# Altium footprint library 1.10-电容.PcbLib: 193 footprints (part 2 of 13)
Each footprint in its own frame and in the unit in brackets; x right, y up, seen from the top. Pads: shape width x height; smd on the part's side, far side on the other; paste and mask are expansions set on the pad; w line width, h text height; cw(c..) or ccw(c..) is an arc to the next point about the centre after c.
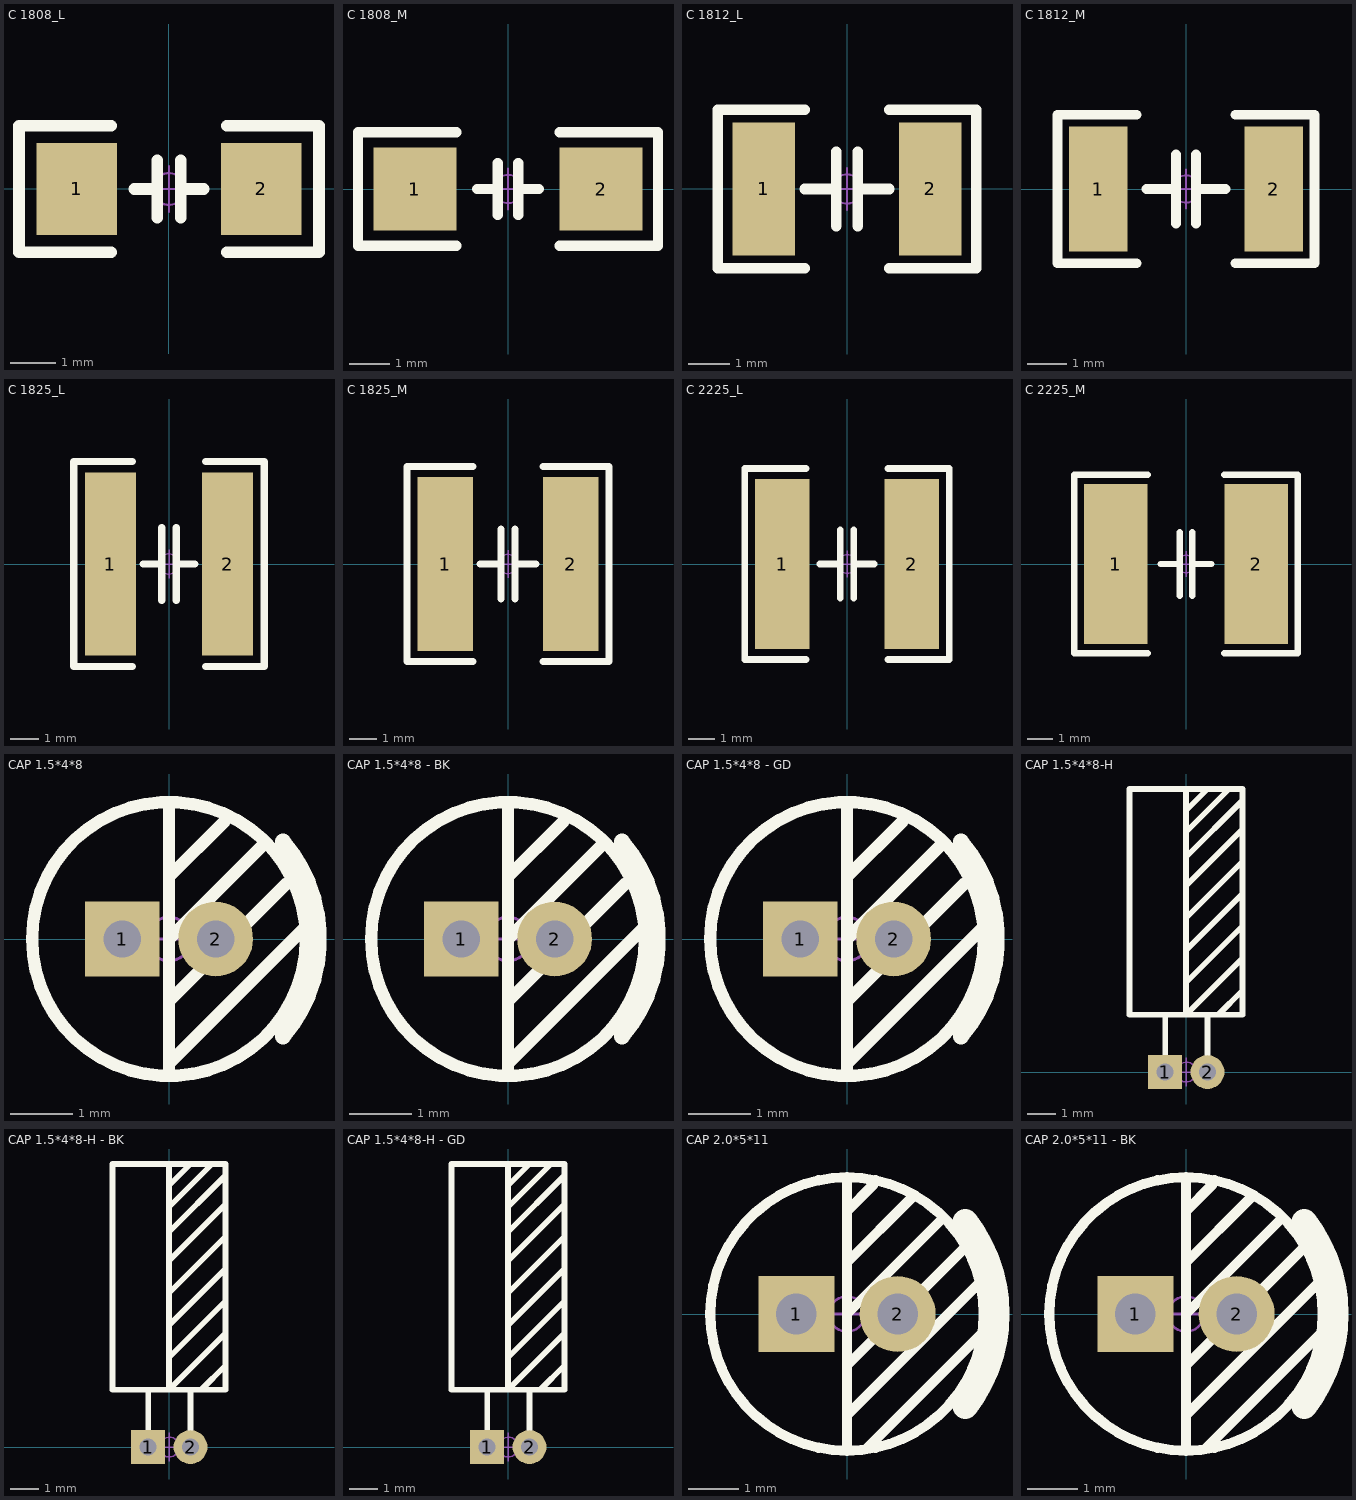
[diagram p1: the footprints below, top view; thin cyan lines are the x and y axes]

## C 1808_L [mil] "无极性贴片电容"
pads (2):
  rect 70x80 smd: 1(-80,0) 2(80,0)
Top Overlay:
  lines w10: -50,-55 -130,-55 -130,55 -50,55 ; -30,0 -10,0 ; -10,-25 -10,25 ; 10,-25 10,25 ; 10,0 30,0 ; 50,-55 130,-55 130,55 50,55
Mechanical 15:
  circle w1.97: c0,0 r13.78
  lines w1.97: -19.68,0 19.68,0 ; 0,-19.68 0,19.68
3D body "C 1808.STEP": height 59.45, standoff -0.39, extent -90.55,-39.76 90.55,39.76

## C 1808_M [mil] "无极性贴片电容"
pads (2):
  rect 80x80 smd: 1(-90,0) 2(90,0)
Top Overlay:
  lines w10: -50,-55 -145,-55 -145,55 -50,55 ; -30,0 -10,0 ; -10,-25 -10,25 ; 10,-25 10,25 ; 10,0 30,0 ; 50,-55 145,-55 145,55 50,55
Mechanical 15:
  circle w1.97: c0,0 r13.78
  lines w1.97: -19.68,0 19.68,0 ; 0,-19.68 0,19.68
3D body "C 1808.STEP": height 59.45, standoff -0.39, extent -90.55,-39.76 90.55,39.76

## C 1812_L [mm] "无极性贴片电容                             淘宝ID:黄晶宝石"
pads (2):
  rect 1.5x3.2 smd: 1(-2,0) 2(2,0)
Top Overlay:
  lines w0.254: -1.016,-1.905 -3.1,-1.905 -3.1,1.905 -1.016,1.905 ; -1.016,0 -0.254,0 ; -0.254,-0.889 -0.254,0.889 ; 0.254,-0.889 0.254,0.889 ; 0.254,0 1.016,0 ; 1.016,-1.905 3.1,-1.905 3.1,1.905 1.016,1.905
Mechanical 15:
  circle w0.05: c0,0 r0.35
  lines w0.05: -0.5,0 0.5,0 ; 0,-0.5 0,0.5
3D body "C 1812.STEP": height 2.01, standoff -0.01, extent -2.3,-1.61 2.3,1.61

## C 1812_M [mm] "无极性贴片电容                             淘宝ID:黄晶宝石"
pads (2):
  rect 1.5x3.2 smd: 1(-2.25,0) 2(2.25,0)
Top Overlay:
  lines w0.254: -1.27,-1.905 -3.302,-1.905 -3.302,1.905 -1.27,1.905 ; -1.016,0 -0.254,0 ; -0.254,-0.889 -0.254,0.889 ; 0.254,-0.889 0.254,0.889 ; 0.254,0 1.016,0 ; 1.27,-1.905 3.302,-1.905 3.302,-0.508 3.302,1.905 1.27,1.905
Mechanical 15:
  circle w0.05: c0,0 r0.35
  lines w0.05: -0.5,0 0.5,0 ; 0,-0.5 0,0.5
3D body "C 1812.STEP": height 2.01, standoff -0.01, extent -2.3,-1.61 2.3,1.61

## C 1825_L [mil] "无极性贴片电容"
pads (2):
  rect 70x250 smd: 1(-80,0) 2(80,0)
Top Overlay:
  lines w10: -50,-140 -130,-140 -130,140 -50,140 ; -35,0 -10,0 ; -10,-50 -10,50 ; 10,-50 10,50 ; 10,0 35,0 ; 50,-140 130,-140 130,140 50,140
Mechanical 15:
  circle w1.97: c0,0 r13.78
  lines w1.97: -19.68,0 19.68,0 ; 0,-19.68 0,19.68
3D body "C 1825.STEP": height 63.39, standoff -0.39, extent -88.58,-125.4 88.58,125.4

## C 1825_M [mil] "无极性贴片电容                              淘宝ID:黄晶宝石"
pads (2):
  rect 80x250 smd: 1(-90,0) 2(90,0)
Top Overlay:
  lines w10: -50,-140 -145,-140 -145,140 -50,140 ; -40,0 -10,0 ; -10,-50 -10,50 ; 10,-50 10,50 ; 10,0 40,0 ; 50,-140 145,-140 145,140 50,140
Mechanical 15:
  circle w1.97: c0,0 r13.78
  lines w1.97: -19.68,0 19.68,0 ; 0,-19.68 0,19.68
3D body "C 1825.STEP": height 63.39, standoff -0.39, extent -88.58,-125.4 88.58,125.4

## C 2225_L [mil] "无极性贴片电容"
pads (2):
  rect 80x250 smd: 1(-95,0) 2(95,0)
Top Overlay:
  lines w10: -60,-140 -150,-140 -150,140 -60,140 ; -40,0 -10,0 ; -10,-50 -10,50 ; 10,-50 10,50 ; 10,0 40,0 ; 60,-140 150,-140 150,140 60,140
Mechanical 15:
  circle w1.97: c0,0 r13.78
  lines w1.97: -19.68,0 19.68,0 ; 0,-19.68 0,19.68
3D body "C 2225.STEP": height 63.39, standoff -0.39, extent -110.24,-125.4 110.24,125.4

## C 2225_M [mil] "无极性贴片电容"
pads (2):
  rect 100x250 smd: 1(-110,0) 2(110,0)
Top Overlay:
  lines w10: -60,-140 -175,-140 -175,140 -60,140 ; -40,0 -10,0 ; -10,-50 -10,50 ; 10,-50 10,50 ; 10,0 40,0 ; 60,-140 175,-140 175,140 60,140
Mechanical 15:
  circle w1.97: c0,0 r13.78
  lines w1.97: -19.68,0 19.68,0 ; 0,-19.68 0,19.68
3D body "C 2225.STEP": height 63.39, standoff -0.39, extent -110.24,-125.4 110.24,125.4

## CAP 1.5*4*8 [mm] "脚距1.5mm直径4mm高度8mm                    淘宝ID:黄晶宝石"
pads (2):
  rect 1.2x1.2 hole 0.6: 1(-0.75,0)
  round 1.2 hole 0.6: 2(0.75,0)
Top Overlay:
  circle w0.2: c0,0 r2.2
  lines w0.2: 0,-2.159 0,-2 ; 0,-1 1.897,0.897 ; 0,0 1.524,1.524 ; 0,1 0.897,1.897 ; 0,2.159 0,-2 ; 2.207,0.206 0,-2
  lines w0.254: 1.83,-1.568 ccw(c0,0) 1.83,1.568
Mechanical 15:
  circle w0.05: c0,0 r0.35
  lines w0.05: -0.5,0 0.5,0 ; 0,-0.5 0,0.5
3D body "CAP 1.5X4X8.STEP": height 8.04, standoff -3.46, extent -2,-1.999 2.02,1.999

## CAP 1.5*4*8 - BK [mm] "脚距1.5mm直径4mm高度8mm                       淘宝ID:黄晶宝石"
pads (2):
  rect 1.2x1.2 hole 0.6: 1(-0.75,0)
  round 1.2 hole 0.6: 2(0.75,0)
Top Overlay:
  circle w0.2: c0,0 r2.2
  lines w0.2: 0,-2.159 0,-2 ; 0,-1 1.897,0.897 ; 0,0 1.524,1.524 ; 0,1 0.897,1.897 ; 0,2.159 0,-2 ; 2.207,0.206 0,-2
  lines w0.254: 1.83,-1.568 ccw(c0,0) 1.83,1.568
Mechanical 15:
  circle w0.05: c0,0 r0.35
  lines w0.05: -0.5,0 0.5,0 ; 0,-0.5 0,0.5
3D body "CAP 1.5X4X8.STEP": height 8.05, standoff -3.45, extent -2,-1.999 2.02,1.999

## CAP 1.5*4*8 - GD [mm] "脚距1.5mm直径4mm高度8mm               淘宝ID:黄晶宝石"
pads (2):
  rect 1.2x1.2 hole 0.6: 1(-0.75,0)
  round 1.2 hole 0.6: 2(0.75,0)
Top Overlay:
  circle w0.2: c0,0 r2.2
  lines w0.2: 0,-2.159 0,-2 ; 0,-1 1.897,0.897 ; 0,0 1.524,1.524 ; 0,1 0.897,1.897 ; 0,2.159 0,-2 ; 2.207,0.206 0,-2
  lines w0.254: 1.83,-1.568 ccw(c0,0) 1.83,1.568
Mechanical 15:
  circle w0.05: c0,0 r0.35
  lines w0.05: -0.5,0 0.5,0 ; 0,-0.5 0,0.5
3D body "CAP 1.5X4X8.STEP": height 8.06, standoff -3.44, extent -2,-1.999 2.02,1.999

## CAP 1.5*4*8-H [mm] "脚距1.5mm直径4mm高度8mm"
pads (2):
  rect 1.2x1.2 hole 0.6: 1(-0.75,0)
  round 1.2 hole 0.6: 2(0.75,0)
Top Overlay:
  lines w0.2: -0.75,0 -0.75,2 ; -0.012,3.175 1.988,5.175 1.988,5.207 ; -0.012,4.318 1.988,6.318 1.988,6.35 ; -0.012,5.461 1.988,7.461 1.988,7.493 ; -0.012,6.604 1.988,8.604 1.988,8.636 ; -0.012,7.62 1.965,9.597 ccw(c1.911,9.652) 1.988,9.652 ; -0.012,8.509 1.51,10.031 cw(c1.512,10.03) 1.512,10.032 ; -0.012,9.271 0.748,10.031 cw(c0.75,10.03) 0.75,10.032 ; -0.012,10.032 -0.012,2.032 ; 0.75,0 0.75,2 ; 0.877,2.921 -0.012,2.032 ; 1.131,2.032 1.988,2.889 1.988,2.921 ; 1.988,4.064 1.988,4.032 -0.012,2.032 ; -2.012,2.032 -2.012,10.032 1.988,10.032 1.988,2.032 -2.012,2.032
Mechanical 15:
  circle w0.05: c0,0 r0.35
  lines w0.05: -0.5,0 0.5,0 ; 0,-0.5 0,0.5
3D body "CAP 1.5X4X8-H.STEP": height 4.02, standoff -3.48, extent -2,-0.25 2.02,10

## CAP 1.5*4*8-H - BK [mm] "脚距1.5mm直径4mm高度8mm           淘宝ID:黄晶宝石"
pads (2):
  rect 1.2x1.2 hole 0.6: 1(-0.75,0)
  round 1.2 hole 0.6: 2(0.75,0)
Top Overlay:
  lines w0.2: -0.75,0 -0.75,2 ; -0.012,3.175 1.988,5.175 1.988,5.207 ; -0.012,4.318 1.988,6.318 1.988,6.35 ; -0.012,5.461 1.988,7.461 1.988,7.493 ; -0.012,6.604 1.988,8.604 1.988,8.636 ; -0.012,7.62 1.965,9.597 ccw(c1.911,9.652) 1.988,9.652 ; -0.012,8.509 1.51,10.031 cw(c1.512,10.03) 1.512,10.032 ; -0.012,9.271 0.748,10.031 cw(c0.75,10.03) 0.75,10.032 ; -0.012,10.032 -0.012,2.032 ; 0.75,0 0.75,2 ; 0.877,2.921 -0.012,2.032 ; 1.131,2.032 1.988,2.889 1.988,2.921 ; 1.988,4.064 1.988,4.032 -0.012,2.032 ; -2.012,2.032 -2.012,10.032 1.988,10.032 1.988,2.032 -2.012,2.032
Mechanical 15:
  circle w0.05: c0,0 r0.35
  lines w0.05: -0.5,0 0.5,0 ; 0,-0.5 0,0.5
3D body "CAP 1.5X4X8-H.STEP": height 4.02, standoff -3.48, extent -2,-0.25 2.02,10

## CAP 1.5*4*8-H - GD [mm] "脚距1.5mm直径4mm高度8mm"
pads (2):
  rect 1.2x1.2 hole 0.6: 1(-0.75,0)
  round 1.2 hole 0.6: 2(0.75,0)
Top Overlay:
  lines w0.2: -0.75,0 -0.75,2 ; -0.012,3.175 1.988,5.175 1.988,5.207 ; -0.012,4.318 1.988,6.318 1.988,6.35 ; -0.012,5.461 1.988,7.461 1.988,7.493 ; -0.012,6.604 1.988,8.604 1.988,8.636 ; -0.012,7.62 1.965,9.597 ccw(c1.911,9.652) 1.988,9.652 ; -0.012,8.509 1.51,10.031 cw(c1.512,10.03) 1.512,10.032 ; -0.012,9.271 0.748,10.031 cw(c0.75,10.03) 0.75,10.032 ; -0.012,10.032 -0.012,2.032 ; 0.75,0 0.75,2 ; 0.877,2.921 -0.012,2.032 ; 1.131,2.032 1.988,2.889 1.988,2.921 ; 1.988,4.064 1.988,4.032 -0.012,2.032 ; -2.012,2.032 1.988,2.032 1.988,10.032 -2.012,10.032 -2.012,2.032
Mechanical 15:
  circle w0.05: c0,0 r0.35
  lines w0.05: -0.5,0 0.5,0 ; 0,-0.5 0,0.5
3D body "CAP 1.5X4X8-H.STEP": height 4.02, standoff -3.48, extent -2,-0.25 2.02,10

## CAP 2.0*5*11 [mm] "脚距2mm直径5mm高度11mm                 淘宝ID:黄晶宝石"
pads (2):
  rect 1.5x1.5 hole 0.8: 1(-1,0)
  round 1.5 hole 0.8: 2(1,0)
Top Overlay:
  circle w0.2: c0,0 r2.7
  lines w0.2: 0,-2.667 0,-2 ; 0,-1.016 2.286,1.27 ; 0,0 1.905,1.905 ; 0,1.016 1.27,2.286 ; 0,2.032 0.508,2.54 ; 0,2.667 0,-2 ; 0.381,-2.667 2.667,-0.381 ; 2.651,0.651 0,-2
  lines w0.5: 2.338,-1.819 ccw(c0,0) 2.338,1.819
Mechanical 15:
  circle w0.05: c0,0 r0.35
  lines w0.05: -0.5,0 0.5,0 ; 0,-0.5 0,0.5
3D body "CAP 2X5X11.STEP": height 11.04, standoff -3.42, extent -2.5,-2.499 2.51,2.499

## CAP 2.0*5*11 - BK [mm] "脚距2mm直径5mm高度11mm"
pads (2):
  rect 1.5x1.5 hole 0.8: 1(-1,0)
  round 1.5 hole 0.8: 2(1,0)
Top Overlay:
  circle w0.2: c0,0 r2.7
  lines w0.2: 0,-2.667 0,-2 ; 0,-1.016 2.286,1.27 ; 0,0 1.905,1.905 ; 0,1.016 1.27,2.286 ; 0,2.032 0.508,2.54 ; 0,2.667 0,-2 ; 0.381,-2.667 2.667,-0.381 ; 2.651,0.651 0,-2
  lines w0.5: 2.338,-1.819 ccw(c0,0) 2.338,1.819
Mechanical 15:
  circle w0.05: c0,0 r0.35
  lines w0.05: -0.5,0 0.5,0 ; 0,-0.5 0,0.5
3D body "CAP 2X5X11.STEP": height 11.04, standoff -3.42, extent -2.5,-2.499 2.51,2.499